# Altium footprint library Passive.PcbLib: 17 footprints (part 1 of 2)
Each footprint in its own frame and in the unit in brackets; x right, y up, seen from the top. Pads: shape width x height; smd on the part's side, far side on the other; paste and mask are expansions set on the pad; w line width, h text height; cw(c..) or ccw(c..) is an arc to the next point about the centre after c.
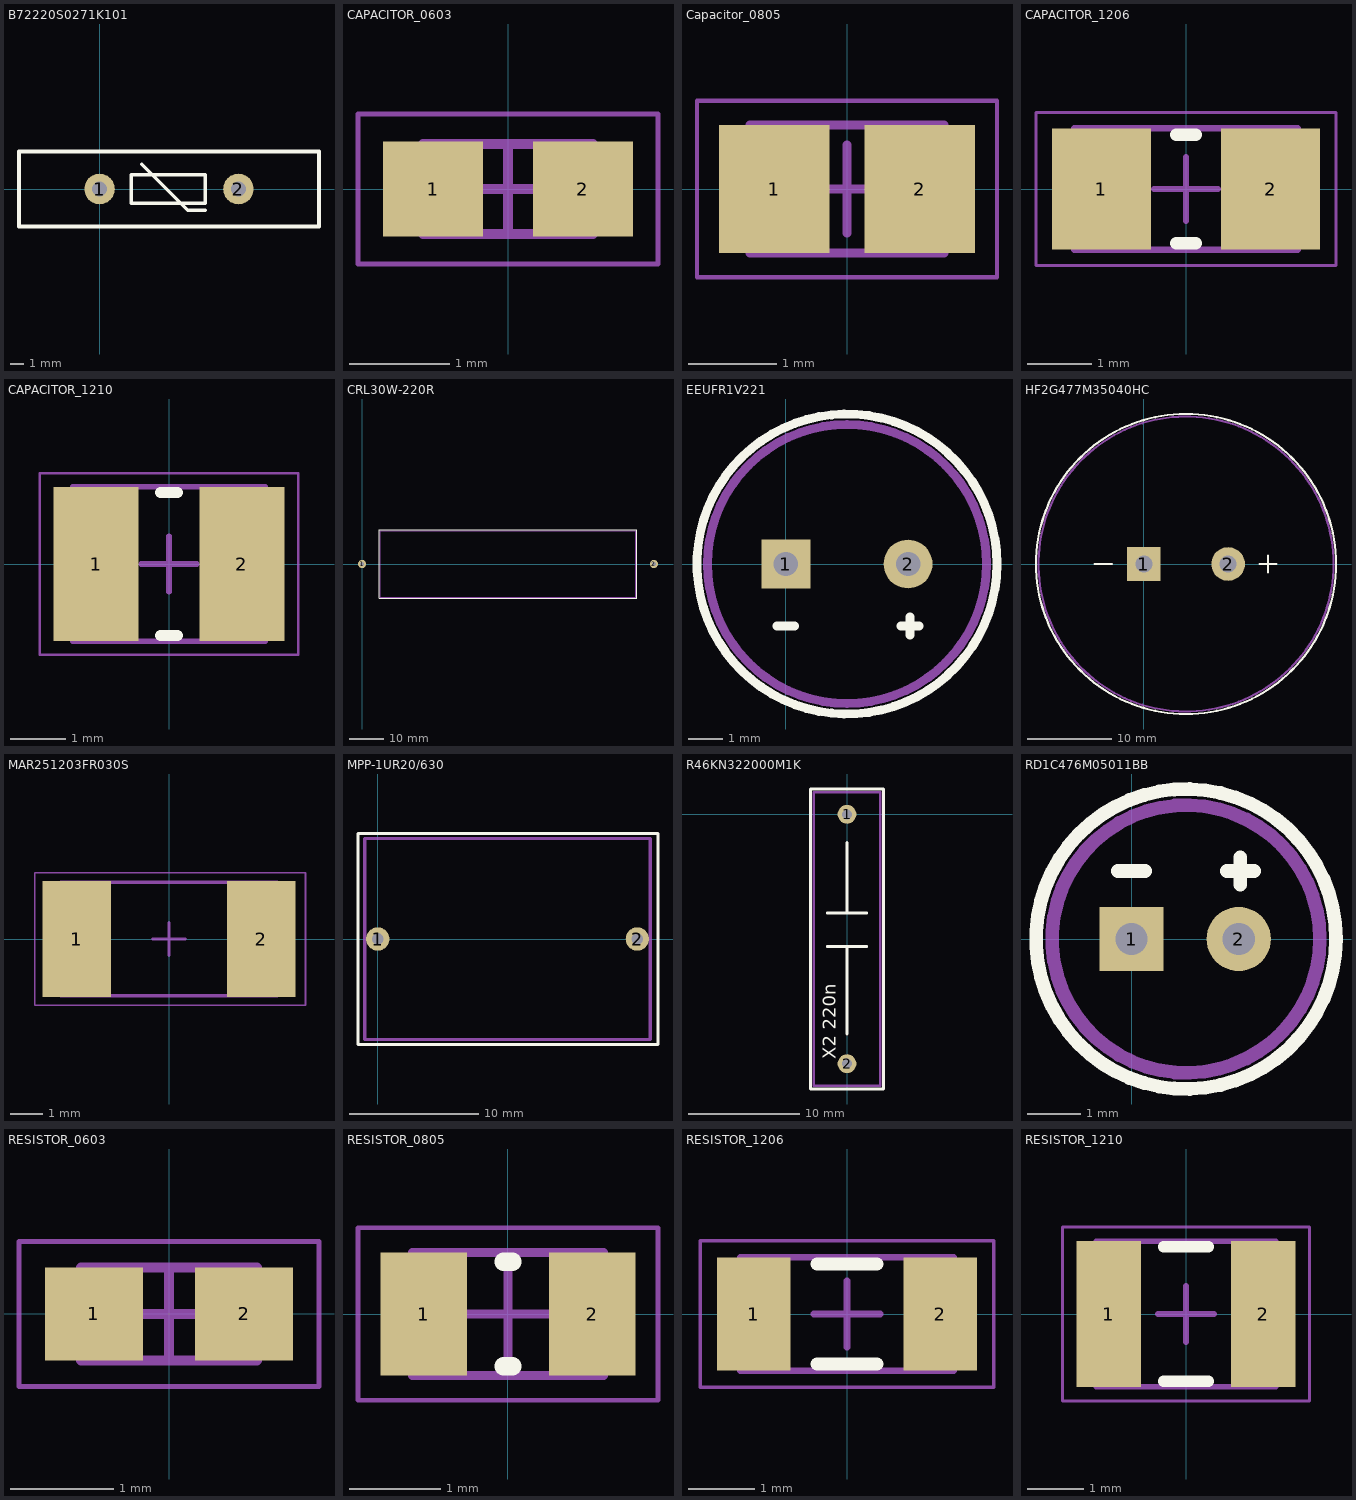
[diagram p0: the footprints below, top view; thin cyan lines are the x and y axes]

## B72220S0271K101 [mm]
height 25.5
pads (2):
  round 2.2 hole 1.1: 1(0,0) 2(10,0)
Top Overlay:
  lines w0.254: 3.048,1.778 6.35,-1.524 7.62,-1.524 ; -5.8,-2.7 -5.8,2.7 15.8,2.7 15.8,-2.7 -5.8,-2.7 ; 2.286,-1.016 7.62,-1.016 7.62,1.016 2.286,1.016 2.286,0 2.286,-1.016
  text ".DESIGNATOR" at 0.038,2.978 h1

## CAPACITOR_0603 [mm] "MLCC capacitor in 0603 package"
height 0.9
pads (2):
  rect 1x0.95 smd: 1(-0.75,0) 2(0.75,0)
Top Overlay:
  text ".DESIGNATOR" at -1.478,0.802 h1
Mechanical 13:
  lines w0.1: -0.85,-0.45 -0.85,0.45 0.85,0.45 0.85,-0.45 -0.85,-0.45
Mechanical 15:
  lines w0.05: -1.5,-0.75 -1.5,0.75 1.5,0.75 1.5,-0.75 -1.5,-0.75
  lines w0.1: -0.45,0 0.45,0 ; 0,-0.45 0,0.45
3D body "CAPACITOR_0603.step": height 0.9, standoff 0, extent -0.85,-0.45 0.85,0.45

## Capacitor_0805 [mm] "MLCC capacitor in 0805 package"
height 1.35
pads (2):
  rect 1.25x1.45 smd: 1(-0.825,0) 2(0.825,0)
Top Overlay:
  text ".DESIGNATOR" at -1.657,1.057 h1
Mechanical 13:
  lines w0.1: -1.1,-0.725 -1.1,0.725 1.1,0.725 1.1,-0.725 -1.1,-0.725
Mechanical 15:
  lines w0.05: -1.7,-1 -1.7,1 1.7,1 1.7,-1 -1.7,-1
  lines w0.1: -0.5,0 0.5,0 ; 0,-0.5 0,0.5
3D body "Capacitor_0805.step": height 1.35, standoff 0, extent -1.1,-0.725 1.1,0.725

## CAPACITOR_1206 [mm] "MLCC capacitor in 1206 package"
height 1.9
pads (2):
  rect 1.55x1.9 smd: 1(-1.325,0) 2(1.325,0)
Top Overlay:
  lines w0.2: -0.15,-0.85 0.15,-0.85 ; -0.15,0.85 0.15,0.85
  text ".DESIGNATOR" at -2.318,1.246 h1
Mechanical 13:
  lines w0.1: -1.75,-0.95 -1.75,0.95 1.75,0.95 1.75,-0.95 -1.75,-0.95
Mechanical 15:
  lines w0.05: -2.35,-1.2 -2.35,1.2 2.35,1.2 2.35,-1.2 -2.35,-1.2
  lines w0.1: -0.5,0 0.5,0 ; 0,-0.5 0,0.5
3D body "CAPACITOR_1206.step": height 1.9, standoff 0, extent -1.75,-0.95 1.75,0.95

## CAPACITOR_1210 [mm] "MLCC capacitor in 1210 package"
height 2.8
pads (2):
  rect 1.55x2.8 smd: 1(-1.325,0) 2(1.325,0)
Top Overlay:
  lines w0.2: -0.15,-1.3 0.15,-1.3 ; -0.15,1.3 0.15,1.3
  text ".DESIGNATOR" at -2.323,1.716 h1
Mechanical 13:
  lines w0.1: -1.75,-1.4 -1.75,1.4 1.75,1.4 1.75,-1.4 -1.75,-1.4
Mechanical 15:
  lines w0.05: -2.35,-1.65 -2.35,1.65 2.35,1.65 2.35,-1.65 -2.35,-1.65
  lines w0.1: -0.5,0 0.5,0 ; 0,-0.5 0,0.5
3D body "CAPACITOR_1210.step": height 2.8, standoff 0, extent -1.75,-1.4 1.75,1.4

## CRL30W-220R [mm] "30W 220? cement resistor"
height 17
pads (2):
  round 2.4 hole 1.1: 1(0,0) 2(85,0)
Top Overlay:
  lines w0.254: 5,-10 5,10 80,10 80,-10 5,-10
  text ".DESIGNATOR" at 5.194,10.551 h1
Mechanical 1:
  lines w0.254: 5.334,-9.652 79.756,-9.652 79.756,9.652 5.334,9.652 5.334,-9.652

## EEUFR1V221 [mm] "Capacitor: electrolytic; low ESR; THT; 220uF; 35VDC; O8x11.5mm"
height 11.5
pads (2):
  rect 1.4x1.4 hole 0.7: 1(0,0)
  round 1.4 hole 0.7: 2(3.5,0)
Top Overlay:
  circle w0.254: c1.75,0 r4.3
  lines w0.254: -0.254,-1.778 0.254,-1.778 ; 3.302,-1.778 3.81,-1.778 ; 3.556,-2.032 3.556,-1.524
  text ".DESIGNATOR" at -1.282,4.57 h1
Mechanical 13:
  circle w0.254: c1.75,0 r4

## HF2G477M35040HC [mm] "Capacitor: electrolytic; SNAP-IN; 470uF; 400VDC; O35x40mm; ±20%"
pads (2):
  rect 4x4 hole 2: 1(0,0)
  round 4 hole 2: 2(10,0)
Top Overlay:
  circle w0.254: c5,0 r17.8
  lines w0.254: -5.842,0 -3.81,0 ; 13.716,0 15.748,0 ; 14.732,-1.016 14.732,1.016
  text ".DESIGNATOR" at 5.305,18.402 h1
Mechanical 1:
  circle w0.254: c5,0 r17.5

## MAR251203FR030S [mm] "Thick film 30mW 3W shunt resistor in 2512 package"
height 1.1
pads (2):
  rect 2.11x3.57 smd: 1(-2.85,0) 2(2.85,0)
Top Overlay:
  text ".DESIGNATOR" at -4.104,2.118 h1
Mechanical 13:
  lines w0.1: -3.35,-1.75 -3.35,1.75 3.35,1.75 3.35,-1.75 -3.35,-1.75
Mechanical 15:
  lines w0.05: -4.15,-2.05 -4.15,2.05 4.22,2.05 4.22,-2.05 -4.15,-2.05
  lines w0.1: -0.5,0 0.5,0 ; 0,-0.5 0,0.5
3D body "MAR251203FR010S.step": height 1.1, standoff 0, extent -3.35,-1.75 3.35,1.75

## MPP-1UR20/630 [mm] "Capacitor: polypropylene; 1uF; 630VDC; 22x23.7x15.7mm; THT; ±10%"
height 23.7
pads (2):
  round 1.8 hole 0.9: 1(0,0) 2(20,0)
Top Overlay:
  lines w0.254: -1.524,-8.128 21.59,-8.128 21.59,8.128 -1.524,8.128 -1.524,-8.128
  text ".DESIGNATOR" at -1.397,8.393 h1
Mechanical 13:
  lines w0.254: -1,-7.75 21,-7.75 21,7.75 -1,7.75 -1,-7.75

## R46KN322000M1K [mm] "Capacitor: polypropylene; X2; R46; 220nF; 560VDC; 275VAC; THT; ±10%"
height 15
pads (2):
  round 1.7 hole 0.9: 1(0,0) 2(0,-22.5)
Top Overlay:
  lines w0.254: -1.778,-11.938 1.778,-11.938 ; -1.778,-8.89 1.778,-8.89 ; 0,-19.812 0,-11.938 ; 0,-8.89 0,-2.54 ; -3.302,-24.786 3.302,-24.786 3.302,2.286 -3.302,2.286 -3.302,-24.786
  text ".DESIGNATOR" at -3.567,-24.003 h1
  text "X2 220n" at -1.016,-22.098 h1.2
Mechanical 1:
  lines w0.254: -3,-24.5 -3,2 3,2 3,-24.5 -3,-24.5

## RD1C476M05011BB [mm] "Capacitor: electrolytic; THT; 47uF; 16VDC; O5x11mm; Pitch: 2mm; ±20%"
height 11
pads (2):
  rect 1.2x1.2 hole 0.6: 1(0,0)
  round 1.2 hole 0.6: 2(2,0)
Top Overlay:
  circle w0.254: c1.016,0 r2.8
  lines w0.254: -0.254,1.27 0.254,1.27 ; 1.778,1.27 2.286,1.27 ; 2.032,1.016 2.032,1.524
  text ".DESIGNATOR" at -1.014,3.049 h1
Mechanical 13:
  circle w0.254: c1.016,0 r2.5

## RESISTOR_0603 [mm] "SMD resistor in 0603 package"
height 0.55
pads (2):
  rect 0.95x0.9 smd: 1(-0.725,0) 2(0.725,0)
Top Overlay:
  text ".DESIGNATOR" at -1.432,0.75 h1
Mechanical 13:
  lines w0.1: -0.85,-0.45 -0.85,0.45 0.85,0.45 0.85,-0.45 -0.85,-0.45
Mechanical 15:
  lines w0.05: -1.45,-0.7 -1.45,0.7 1.45,0.7 1.45,-0.7 -1.45,-0.7
  lines w0.1: -0.45,0 0.45,0 ; 0,-0.45 0,0.45
3D body "RESISTOR_0603.step": height 0.55, standoff 0, extent -0.85,-0.45 0.85,0.45

## RESISTOR_0805 [mm] "SMD resistor in 0805 package"
height 0.6
pads (2):
  rect 0.95x1.35 smd: 1(-0.925,0) 2(0.925,0)
Top Overlay:
  lines w0.2: -0.05,-0.575 0.05,-0.575 ; -0.05,0.575 0.05,0.575
  text ".DESIGNATOR" at -1.633,0.995 h1
Mechanical 13:
  lines w0.1: -1.05,-0.675 1.05,-0.675 1.05,0.675 -1.05,0.675 -1.05,-0.675
Mechanical 15:
  lines w0.05: -1.65,-0.95 1.65,-0.95 1.65,0.95 -1.65,0.95 -1.65,-0.95
  lines w0.1: -0.5,0 0.5,0 ; 0,-0.5 0,0.5
3D body "RESISTOR_0805.step": height 0.6, standoff 0, extent -1.05,-0.675 1.05,0.675

## RESISTOR_1206 [mm] "SMD resistor in 1206 package"
height 0.65
pads (2):
  rect 1.1x1.7 smd: 1(-1.4,0) 2(1.4,0)
Top Overlay:
  lines w0.2: -0.45,-0.75 0.45,-0.75 ; -0.45,0.75 0.45,0.75
  text ".DESIGNATOR" at -2.189,1.161 h1
Mechanical 13:
  lines w0.1: -1.6,-0.85 1.6,-0.85 1.6,0.85 -1.6,0.85 -1.6,-0.85
Mechanical 15:
  lines w0.05: -2.2,-1.1 2.2,-1.1 2.2,1.1 -2.2,1.1 -2.2,-1.1
  lines w0.1: -0.5,0 0.5,0 ; 0,-0.5 0,0.5
3D body "RESISTOR_1206.step": height 0.65, standoff 0, extent -1.6,-0.85 1.6,0.85

## RESISTOR_1210 [mm] "SMD resistor in 1210 package"
height 0.65
pads (2):
  rect 1.15x2.6 smd: 1(-1.375,0) 2(1.375,0)
Top Overlay:
  lines w0.2: -0.4,-1.2 0.4,-1.2 ; -0.4,1.2 0.4,1.2
  text ".DESIGNATOR" at -2.177,1.616 h1
Mechanical 13:
  lines w0.1: -1.6,-1.3 -1.6,1.3 1.6,1.3 1.6,-1.3 -1.6,-1.3
Mechanical 15:
  lines w0.05: -2.2,-1.55 -2.2,1.55 2.2,1.55 2.2,-1.55 -2.2,-1.55
  lines w0.1: -0.5,0 0.5,0 ; 0,-0.5 0,0.5
3D body "RESISTOR_1210.step": height 0.65, standoff 0, extent -1.6,-1.3 1.6,1.3